# Altium schematic symbol library BTN Motor.SCHLIB: 13 symbols
Pins are listed as number, name and electrical type; pins without a type are passive.

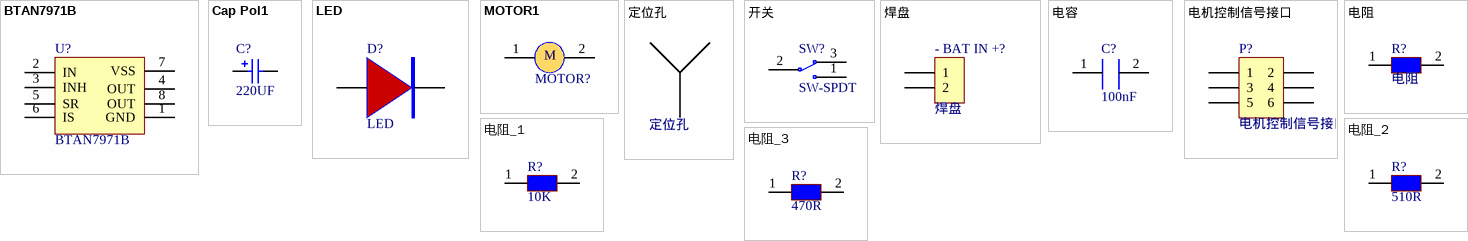
[diagram p0: symbols BTAN7971B to 电阻_3]

## BTAN7971B
designator U?
footprint TO263-7A (263，7脚晶体管)
pins: 1 GND (power), 2 IN (power), 3 INH (power), 4 OUT (power), 5 SR (power), 6 IS (power), 7 VSS (power), 8 OUT (power)

## Cap Pol1
designator C?  value 220UF  (hidden comment: Cap Pol1)
Polarized Capacitor (Radial); Published: 8-Jun-2000; LatestRevisionDate: 17-Jul-2002; LatestRevisionNote: Re-released for DXP Platform.; PackageReference: RB7.6-15; Publisher: Altium Limited; PackageDescription: Polarized Capacitor (Radial); 2 Leads
footprint RB7.6-15 (Polarized Capacitor (Radial); 2 Leads)
simulation model CAP (Capacitor)
signal-integrity model Cap Pol
footprint CAP 2.5*6.3*7 - BK (脚距2.5mm直径6.3mm高度7mm)
pins: 1, 2
1 alternate drawing of the same symbol

## LED
designator D?
footprint LED 0603B (蓝色0603LED)
footprint 0603 LED B
pins: 1 (power), 2 (power)

## MOTOR1
designator MOTOR?  (value not drawn)
footprint 5.08 2P 螺钉端子 (Terminal Block, 17.5A 400V, Pitch 5.08mm, 2 Positions, Screw Connection)
pins: 1 (power), 2 (power)
text: M

## 定位孔
designator *?
footprint M3x7 铜柱+星孔 (M3铜柱，长：7mm，螺纹长：6mm)

## 开关
designator SW?, comment SW-SPDT
footprint 小船开关
pins: 1 (power), 2 (power), 3 (power)

## 焊盘
designator - BAT IN +?
footprint 5.08 2P 螺钉端子 (Terminal Block, 17.5A 400V, Pitch 5.08mm, 2 Positions, Screw Connection)
pins: 1 (power), 2 (power)

## 电容
designator C?, comment 100nF
footprint C0601
pins: 1 (power), 2 (power)

## 电机控制信号接口
designator P?
footprint MX 1.25-WS-6P (长：12.65mm，宽：4.2mm，高：3.4mm)
pins: 1 (power), 2 (power), 3 (power), 4 (power), 5 (power), 6 (power)

## 电阻
designator R?
footprint R0603
pins: 1 (power), 2 (power)

## 电阻_1
designator R?, comment 10K
footprint R0603
pins: 1 (power), 2 (power)

## 电阻_2
designator R?, comment 510R
footprint R0603
pins: 1 (power), 2 (power)

## 电阻_3
designator R?, comment 470R
footprint R0603
pins: 1 (power), 2 (power)